# Altium footprint library SystemCarrier_Import.PcbLib: 29 footprints (part 1 of 2)
Each footprint in its own frame and in the unit in brackets; x right, y up, seen from the top. Pads: shape width x height; smd on the part's side, far side on the other; paste and mask are expansions set on the pad; w line width, h text height; cw(c..) or ccw(c..) is an arc to the next point about the centre after c.
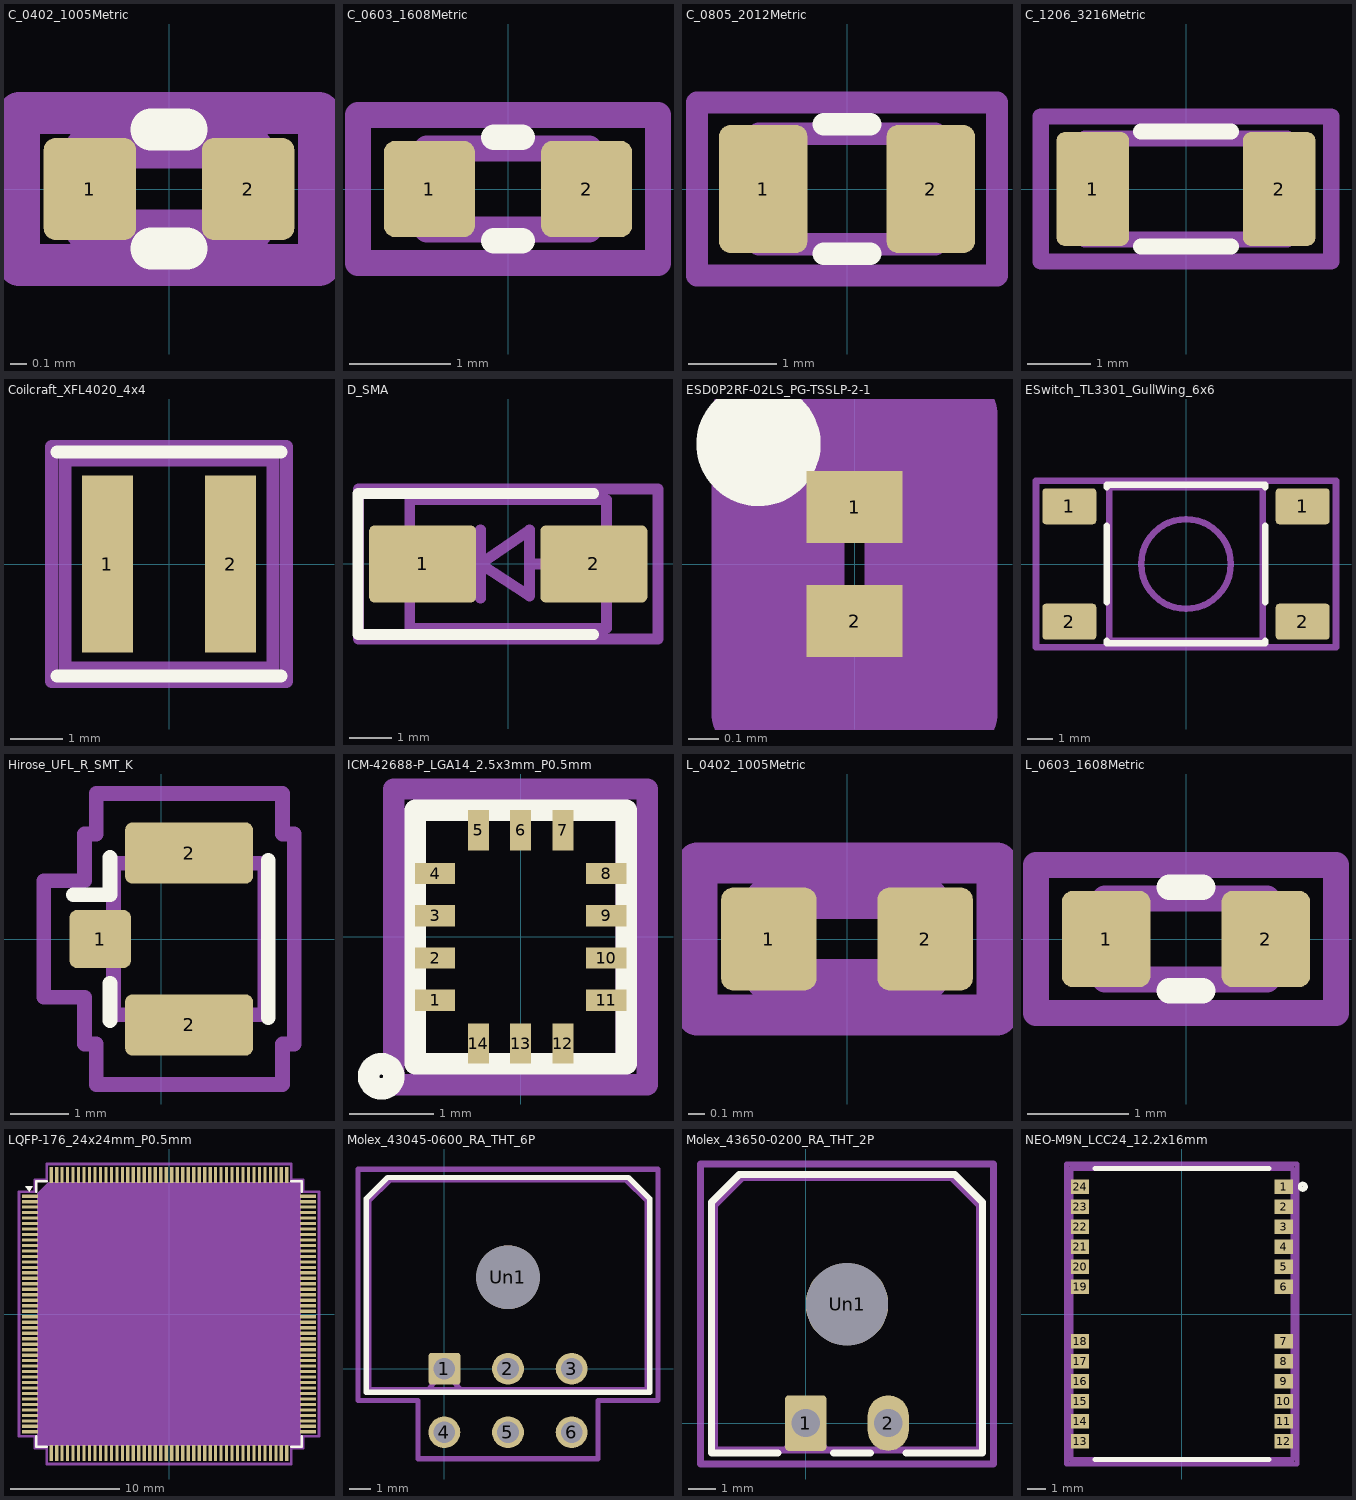
[diagram p0: the footprints below, top view; thin cyan lines are the x and y axes]

## C_0402_1005Metric [mm]
pads (2):
  rrect25% 0.56x0.62 smd: 1(-0.48,0) 2(0.48,0)
F.SilkS:
  lines w0.254: -0.108,-0.36 0.108,-0.36 ; -0.108,0.36 0.108,0.36
F.CrtYd:
  lines w0.254: -0.91,-0.46 -0.91,0.46 0.91,0.46 0.91,-0.46 -0.91,-0.46
F.Fab:
  lines w0.254: -0.5,-0.25 -0.5,0.25 0.5,0.25 0.5,-0.25 -0.5,-0.25
  text "'.Designator'" at -1.014,-0.213 h0.25

## C_0603_1608Metric [mm]
pads (2):
  rrect25% 0.9x0.95 smd: 1(-0.775,0) 2(0.775,0)
F.SilkS:
  lines w0.254: -0.141,-0.51 0.141,-0.51 ; -0.141,0.51 0.141,0.51
F.CrtYd:
  lines w0.254: -1.48,-0.73 -1.48,0.73 1.48,0.73 1.48,-0.73 -1.48,-0.73
F.Fab:
  lines w0.254: -0.8,-0.4 -0.8,0.4 0.8,0.4 0.8,-0.4 -0.8,-0.4
  text "'.Designator'" at -1.619,-0.336 h0.4

## C_0805_2012Metric [mm]
pads (2):
  rrect25% 1x1.45 smd: 1(-0.95,0) 2(0.95,0)
F.SilkS:
  lines w0.254: -0.261,-0.735 0.261,-0.735 ; -0.261,0.735 0.261,0.735
F.CrtYd:
  lines w0.254: -1.7,-0.98 -1.7,0.98 1.7,0.98 1.7,-0.98 -1.7,-0.98
F.Fab:
  lines w0.254: -1,-0.625 -1,0.625 1,0.625 1,-0.625 -1,-0.625
  text "'.Designator'" at -2.028,-0.425 h0.5

## C_1206_3216Metric [mm]
pads (2):
  rrect22% 1.15x1.8 smd: 1(-1.475,0) 2(1.475,0)
F.SilkS:
  lines w0.254: -0.711,-0.91 0.711,-0.91 ; -0.711,0.91 0.711,0.91
F.CrtYd:
  lines w0.254: -2.3,-1.15 -2.3,1.15 2.3,1.15 2.3,-1.15 -2.3,-1.15
F.Fab:
  lines w0.254: -1.6,-0.8 -1.6,0.8 1.6,0.8 1.6,-0.8 -1.6,-0.8
  text "'.Designator'" at -3.237,-0.672 h0.8

## Coilcraft_XFL4020_4x4 [mm]
pads (2):
  rect 0.98x3.4 smd: 1(-1.185,0) 2(1.185,0)
F.SilkS:
  lines w0.254: -2.154,-2.154 2.154,-2.154 ; -2.154,2.154 2.154,2.154
F.CrtYd:
  lines w0.254: -2.26,-2.26 -2.26,2.26 2.26,2.26 2.26,-2.26 -2.26,-2.26
F.Fab:
  lines w0.254: -2,-2 -2,2 2,2 2,-2 -2,-2
  text "'.Designator'" at -4.047,-0.84 h1

## D_SMA [mm]
pads (2):
  rrect14% 2.5x1.8 smd: 1(-2,0) 2(2,0)
F.SilkS:
  lines w0.254: 2,-1.65 -3.51,-1.65 -3.51,1.65 2,1.65
F.CrtYd:
  lines w0.254: -3.5,-1.75 -3.5,1.75 3.5,1.75 3.5,-1.75 -3.5,-1.75
F.Fab:
  lines w0.254: -1.551,-0.001 -0.649,-0.001 ; -0.649,-0.801 -0.649,0.799 ; 0.501,-0.001 1.499,-0.001 ; -0.649,-0.001 0.501,0.799 0.501,-0.75 -0.649,-0.001 ; -2.3,-1.5 -2.3,1.5 2.3,1.5 2.3,-1.5 -2.3,-1.5
  text "'.Designator'" at -4.047,1.66 h1

## ESD0P2RF-02LS_PG-TSSLP-2-1 [mm]
pads (2):
  rect 0.32x0.24 smd: 1(0,0.19) 2(0,-0.19)
F.SilkS:
  circle w0.254: c-0.32,0.4 r0.08
F.CrtYd:
  lines w0.254: -0.35,-0.5 -0.35,0.5 0.35,0.5 0.35,-0.5 -0.35,-0.5
F.Fab:
  lines w0.254: -0.16,-0.31 -0.16,0.31 0.16,0.31 0.16,-0.31 -0.16,-0.31

## ESwitch_TL3301_GullWing_6x6 [mm]
pads (4):
  rrect18% 2.1x1.4 smd: 1(-4.55,2.25) 1(4.55,2.25) 2(-4.55,-2.25) 2(4.55,-2.25)
F.SilkS:
  lines w0.254: -3.1,-3 -3.1,-3.1 3.1,-3.1 3.1,-3 ; -3.1,-1.5 -3.1,1.5 ; -3.1,3 -3.1,3.1 3.1,3.1 3.1,3 ; 3.1,-1.5 3.1,1.5
F.CrtYd:
  lines w0.254: -5.85,-3.25 -5.85,3.25 5.85,3.25 5.85,-3.25 -5.85,-3.25
F.Fab:
  circle w0.254: c0,0 r1.75
  lines w0.254: -3,-3 -3,3 3,3 3,-3 -3,-3
  text "'.Designator'" at -4.047,-0.84 h1

## Hirose_UFL_R_SMT_K [mm]
pads (3):
  rrect25% 1.05x1 smd: 1(-1.05,0)
  rrect24% 2.2x1.05 smd: 2(0.475,-1.475) 2(0.475,1.475)
F.SilkS:
  lines w0.254: -1.515,0.76 -0.885,0.76 -0.885,1.4 ; -0.885,-1.4 -0.885,-0.76 ; 1.835,-1.35 1.835,1.35
F.Mask:
  lines w0.254: -0.515,-0.94 -0.515,0.94 1.575,0.94 1.575,-0.94 -0.515,-0.94
F.CrtYd:
  lines w0.254: -2.02,-1 -2.02,1 -1.32,1 -1.32,1.8 -1.12,1.8 -1.12,2.5 2.08,2.5 2.08,1.8 2.28,1.8 2.28,-1.8 2.08,-1.8 2.08,-2.5 -1.12,-2.5 -1.12,-1.8 -1.32,-1.8 -1.32,-1 -2.02,-1
F.Fab:
  lines w0.254: -1.075,-0.3 -1.075,0.15 -0.925,0.3 -0.825,0.3 -0.825,1.3 -0.425,1.3 -0.425,1.5 1.375,1.5 1.375,1.3 1.775,1.3 1.775,-1.3 1.375,-1.3 1.375,-1.5 -0.425,-1.5 -0.425,-1.3 -0.825,-1.3 -0.825,-0.3 -1.075,-0.3
  text "'.Designator'" at 0.979,-2.428 h0.6

## ICM-42688-P_LGA14_2.5x3mm_P0.5mm [mm]
pads (14):
  rect 0.475x0.25 smd: 1(-1.012,-0.75) 2(-1.012,-0.25) 3(-1.012,0.25) 4(-1.012,0.75) 8(1.012,0.75) 9(1.012,0.25) 10(1.012,-0.25) 11(1.012,-0.75)
  rect 0.25x0.475 smd: 5(-0.5,1.262) 6(0,1.262) 7(0.5,1.262) 12(0.5,-1.262) 13(0,-1.262) 14(-0.5,-1.262)
F.SilkS:
  circle w0.254: c-1.65,-1.65 r0.15
  lines w0.254: -1.25,-1.5 1.25,-1.5 1.25,1.5 -1.25,1.5 -1.25,-1.5
F.CrtYd:
  lines w0.254: -1.5,-1.75 -1.5,1.75 1.5,1.75 1.5,-1.75 -1.5,-1.75
F.Fab:
  lines w0.254: -1.25,-1.5 -1.25,1.5 1.25,1.5 1.25,-1.5 -1.25,-1.5

## L_0402_1005Metric [mm]
pads (2):
  rrect25% 0.59x0.64 smd: 1(-0.485,0) 2(0.485,0)
F.CrtYd:
  lines w0.254: -0.93,-0.47 -0.93,0.47 0.93,0.47 0.93,-0.47 -0.93,-0.47
F.Fab:
  lines w0.254: -0.5,-0.25 -0.5,0.25 0.5,0.25 0.5,-0.25 -0.5,-0.25
  text "'.Designator'" at -1.014,-0.213 h0.25

## L_0603_1608Metric [mm]
pads (2):
  rrect25% 0.875x0.95 smd: 1(-0.787,0) 2(0.787,0)
F.SilkS:
  lines w0.254: -0.163,-0.51 0.163,-0.51 ; -0.163,0.51 0.163,0.51
F.CrtYd:
  lines w0.254: -1.48,-0.73 -1.48,0.73 1.48,0.73 1.48,-0.73 -1.48,-0.73
F.Fab:
  lines w0.254: -0.8,-0.4 -0.8,0.4 0.8,0.4 0.8,-0.4 -0.8,-0.4
  text "'.Designator'" at -1.619,-0.336 h0.4

## LQFP-176_24x24mm_P0.5mm [mm]
pads (176):
  rrect25% 1.5x0.3 smd: 1(-12.675,10.75) 2(-12.675,10.25) 3(-12.675,9.75) 4(-12.675,9.25) 5(-12.675,8.75) 6(-12.675,8.25) 7(-12.675,7.75) 8(-12.675,7.25) 9(-12.675,6.75) 10(-12.675,6.25) 11(-12.675,5.75) 12(-12.675,5.25) 13(-12.675,4.75) 14(-12.675,4.25) 15(-12.675,3.75) 16(-12.675,3.25) 17(-12.675,2.75) 18(-12.675,2.25) 19(-12.675,1.75) 20(-12.675,1.25) 21(-12.675,0.75) 22(-12.675,0.25) 23(-12.675,-0.25) 24(-12.675,-0.75) 25(-12.675,-1.25) 26(-12.675,-1.75) 27(-12.675,-2.25) 28(-12.675,-2.75) 29(-12.675,-3.25) 30(-12.675,-3.75) 31(-12.675,-4.25) 32(-12.675,-4.75) 33(-12.675,-5.25) 34(-12.675,-5.75) 35(-12.675,-6.25) 36(-12.675,-6.75) 37(-12.675,-7.25) 38(-12.675,-7.75) 39(-12.675,-8.25) 40(-12.675,-8.75) 41(-12.675,-9.25) 42(-12.675,-9.75) 43(-12.675,-10.25) 44(-12.675,-10.75) 89(12.675,-10.75) 90(12.675,-10.25) 91(12.675,-9.75) 92(12.675,-9.25) 93(12.675,-8.75) 94(12.675,-8.25) 95(12.675,-7.75) 96(12.675,-7.25) 97(12.675,-6.75) 98(12.675,-6.25) 99(12.675,-5.75) 100(12.675,-5.25) 101(12.675,-4.75) 102(12.675,-4.25) 103(12.675,-3.75) 104(12.675,-3.25) 105(12.675,-2.75) 106(12.675,-2.25) 107(12.675,-1.75) 108(12.675,-1.25) 109(12.675,-0.75) 110(12.675,-0.25) 111(12.675,0.25) 112(12.675,0.75) 113(12.675,1.25) 114(12.675,1.75) 115(12.675,2.25) 116(12.675,2.75) 117(12.675,3.25) 118(12.675,3.75) 119(12.675,4.25) 120(12.675,4.75) 121(12.675,5.25) 122(12.675,5.75) 123(12.675,6.25) 124(12.675,6.75) 125(12.675,7.25) 126(12.675,7.75) 127(12.675,8.25) 128(12.675,8.75) 129(12.675,9.25) 130(12.675,9.75) 131(12.675,10.25) 132(12.675,10.75)
  rrect25% 0.3x1.5 smd: 45(-10.75,-12.675) 46(-10.25,-12.675) 47(-9.75,-12.675) 48(-9.25,-12.675) 49(-8.75,-12.675) 50(-8.25,-12.675) 51(-7.75,-12.675) 52(-7.25,-12.675) 53(-6.75,-12.675) 54(-6.25,-12.675) 55(-5.75,-12.675) 56(-5.25,-12.675) 57(-4.75,-12.675) 58(-4.25,-12.675) 59(-3.75,-12.675) 60(-3.25,-12.675) 61(-2.75,-12.675) 62(-2.25,-12.675) 63(-1.75,-12.675) 64(-1.25,-12.675) 65(-0.75,-12.675) 66(-0.25,-12.675) 67(0.25,-12.675) 68(0.75,-12.675) 69(1.25,-12.675) 70(1.75,-12.675) 71(2.25,-12.675) 72(2.75,-12.675) 73(3.25,-12.675) 74(3.75,-12.675) 75(4.25,-12.675) 76(4.75,-12.675) 77(5.25,-12.675) 78(5.75,-12.675) 79(6.25,-12.675) 80(6.75,-12.675) 81(7.25,-12.675) 82(7.75,-12.675) 83(8.25,-12.675) 84(8.75,-12.675) 85(9.25,-12.675) 86(9.75,-12.675) 87(10.25,-12.675) 88(10.75,-12.675) 133(10.75,12.675) 134(10.25,12.675) 135(9.75,12.675) 136(9.25,12.675) 137(8.75,12.675) 138(8.25,12.675) 139(7.75,12.675) 140(7.25,12.675) 141(6.75,12.675) 142(6.25,12.675) 143(5.75,12.675) 144(5.25,12.675) 145(4.75,12.675) 146(4.25,12.675) 147(3.75,12.675) 148(3.25,12.675) 149(2.75,12.675) 150(2.25,12.675) 151(1.75,12.675) 152(1.25,12.675) 153(0.75,12.675) 154(0.25,12.675) 155(-0.25,12.675) 156(-0.75,12.675) 157(-1.25,12.675) 158(-1.75,12.675) 159(-2.25,12.675) 160(-2.75,12.675) 161(-3.25,12.675) 162(-3.75,12.675) 163(-4.25,12.675) 164(-4.75,12.675) 165(-5.25,12.675) 166(-5.75,12.675) 167(-6.25,12.675) 168(-6.75,12.675) 169(-7.25,12.675) 170(-7.75,12.675) 171(-8.25,12.675) 172(-8.75,12.675) 173(-9.25,12.675) 174(-9.75,12.675) 175(-10.25,12.675) 176(-10.75,12.675)
F.SilkS:
  region: -12.75,11.16 -13.09,11.63 -12.41,11.63
  lines w0.254: -12.11,-11.16 -12.11,-12.11 -11.16,-12.11 ; -12.11,11.16 -12.11,12.11 -11.16,12.11 ; 11.16,-12.11 12.11,-12.11 12.11,-11.16 ; 11.16,12.11 12.11,12.11 12.11,11.16
F.CrtYd:
  lines w0.254: -13.68,-11.15 -13.68,11.15 -12.25,11.15 -12.25,12.25 -11.15,12.25 -11.15,13.68 11.15,13.68 11.15,12.25 12.25,12.25 12.25,11.15 13.68,11.15 13.68,-11.15 12.25,-11.15 12.25,-12.25 11.15,-12.25 11.15,-13.68 -11.15,-13.68 -11.15,-12.25 -12.25,-12.25 -12.25,-11.15 -13.68,-11.15
F.Fab:
  region: 12,-12 -12,-12 -12,11 -11,12 12,12
  text "'.Designator'" at -4.047,-0.84 h1

## Molex_43045-0600_RA_THT_6P [mm]
pads (7):
  rrect17% 1.5x1.5 hole 1.02: 1(0,0)
  round 1.5 hole 1.02: 2(3,0) 3(6,0) 4(0,-3) 5(3,-3) 6(6,-3)
  round 3 hole 3: Un1(3,4.32)
F.SilkS:
  lines w0.254: -3.685,-1.1 -3.685,8.03 -2.685,9.03 8.685,9.03 9.685,8.03 9.685,-1.1 -3.685,-1.1
F.CrtYd:
  lines w0.254: -4.08,-1.5 -4.08,9.42 10.08,9.42 10.08,-1.5 7.25,-1.5 7.25,-4.25 -1.25,-4.25 -1.25,-1.5 -4.08,-1.5
F.Fab:
  lines w0.254: -0.75,-0.99 0,0 0.75,-0.99 ; -3.575,-0.99 -3.575,7.92 -2.575,8.92 8.575,8.92 9.575,7.92 9.575,-0.99 -3.575,-0.99
  text "'.Designator'" at -1.047,7.38 h1

## Molex_43650-0200_RA_THT_2P [mm]
pads (3):
  rrect17% 1.5x2.02 hole 1.02: 1(0,0)
  rrect100% 1.5x2.02 hole 1.02: 2(3,0)
  round 3 hole 3: Un1(1.5,4.32)
F.SilkS:
  lines w0.254: -1.01,-1.09 -3.435,-1.09 -3.435,8.03 -2.435,9.03 5.435,9.03 6.435,8.03 6.435,-1.09 3.652,-1.09 ; 1.01,-1.09 2.348,-1.09
F.CrtYd:
  lines w0.254: -3.83,-1.49 -3.83,9.42 6.83,9.42 6.83,-1.49 -3.83,-1.49
F.Fab:
  lines w0.254: -0.75,-0.98 0,0 0.75,-0.98 ; -3.325,-0.98 -3.325,7.92 -2.325,8.92 5.325,8.92 6.325,7.92 6.325,-0.98 -3.325,-0.98
  text "'.Designator'" at -2.547,7.38 h1

## NEO-M9N_LCC24_12.2x16mm [mm]
pads (24):
  rect 1x0.8 smd: 1(5.6,7) 2(5.6,5.9) 3(5.6,4.8) 4(5.6,3.7) 5(5.6,2.6) 6(5.6,1.5) 7(5.6,-1.5) 8(5.6,-2.6) 9(5.6,-3.7) 10(5.6,-4.8) 11(5.6,-5.9) 12(5.6,-7) 13(-5.6,-7) 14(-5.6,-5.9) 15(-5.6,-4.8) 16(-5.6,-3.7) 17(-5.6,-2.6) 18(-5.6,-1.5) 19(-5.6,1.5) 20(-5.6,2.6) 21(-5.6,3.7) 22(-5.6,4.8) 23(-5.6,5.9) 24(-5.6,7)
F.SilkS:
  circle w0.254: c6.65,7 r0.15
  lines w0.254: -4.8,-8 4.8,-8 ; -4.8,8 4.8,8
F.CrtYd:
  lines w0.254: -6.35,-8.25 -6.35,8.25 6.35,8.25 6.35,-8.25 -6.35,-8.25
F.Fab:
  lines w0.254: -6.1,-8 -6.1,8 6.1,8 6.1,-8 -6.1,-8